# Altium footprint library Capacitance.PcbLib: 69 footprints (part 1 of 5)
Each footprint in its own frame and in the unit in brackets; x right, y up, seen from the top. Pads: shape width x height; smd on the part's side, far side on the other; paste and mask are expansions set on the pad; w line width, h text height; cw(c..) or ccw(c..) is an arc to the next point about the centre after c.
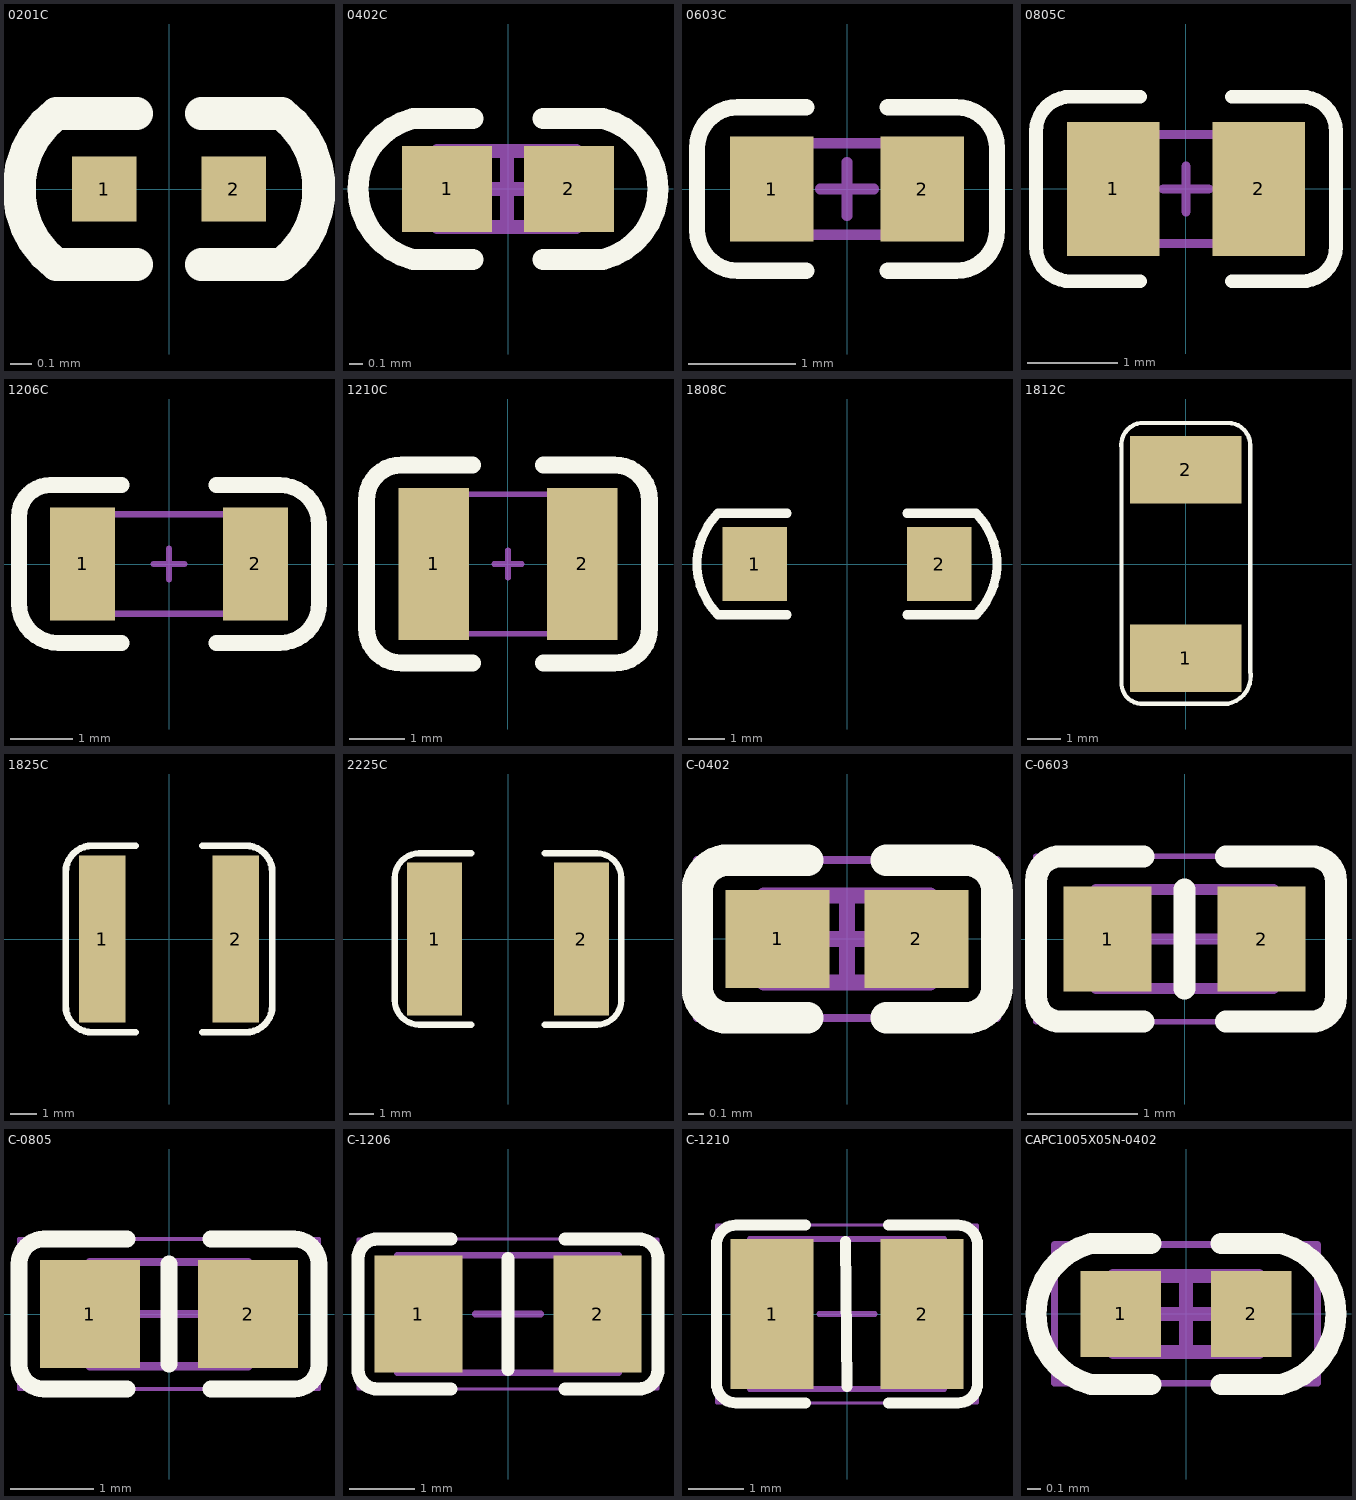
[diagram p0: the footprints below, top view; thin cyan lines are the x and y axes]

## 0201C [mm]
pads (2):
  rect 0.3x0.3 smd: 1(-0.3,0) 2(0.3,0)
Top Overlay:
  lines w0.152: -0.15,-0.35 -0.523,-0.35 cw(c-0.254,0) -0.523,0.35 -0.15,0.35 ; 0.15,-0.35 0.523,-0.35 ccw(c0.254,0) 0.523,0.35 0.15,0.35
Bottom Courtyard:
  text ".Designator" at 7.618,-0.508 h1.52
3D body "0201C.STEP": height 0.31, standoff 0, extent -0.3,-0.152 0.31,0.153

## 0402C [mm]
pads (2):
  rect 0.65x0.62 smd: 1(-0.44,0) 2(0.44,0)
Top Overlay:
  lines w0.152: -0.254,-0.508 -0.686,-0.508 cw(c-0.559,0) -0.686,0.508 -0.254,0.508 ; 0.254,-0.508 0.686,-0.508 ccw(c0.559,0) 0.686,0.508 0.254,0.508
Top Component Outline:
  lines w0.1: -0.508,-0.275 0.492,-0.275 0.492,0.275 -0.508,0.275 -0.508,-0.275
Top Component Center:
  lines w0.1: -0.258,0 0.242,0 ; -0.008,-0.25 -0.008,0.25
Top Value:
  text "'.Comment'" at -1.377,-0.189 h0.64
Top Designator:
  text "'.Designator'" at -2.176,-0.296 h0.76
3D body "CAPC-0402-T0.55-BN.stp": height 0.55, standoff 0, extent -0.533,-0.275 0.517,0.275

## 0603C [mm]
pads (2):
  rect 0.78x0.98 smd: 1(-0.7,0) 2(0.7,0)
Top Overlay:
  lines w0.152: -0.381,-0.762 -1.016,-0.762 cw(c-1.016,-0.381) -1.397,-0.381 -1.397,0.381 cw(c-1.016,0.381) -1.016,0.762 -0.889,0.762 -0.381,0.762 ; 0.381,-0.762 1.016,-0.762 ccw(c1.016,-0.381) 1.397,-0.381 1.397,0.381 ccw(c1.016,0.381) 1.016,0.762 0.381,0.762
Top Component Outline:
  lines w0.1: -0.8,-0.425 0.8,-0.425 0.8,0.425 -0.8,0.425 -0.8,-0.425
Top Component Center:
  lines w0.1: -0.25,0 0.25,0 ; 0,-0.25 0,0.25
Top Value:
  text "'.Comment'" at -1.369,-0.189 h0.64
Top Designator:
  text "'.Designator'" at -2.169,-0.159 h0.76
3D body "C0603C100C3GACTU.stp": height 0.87, standoff 0, extent -0.8,-0.4 0.8,0.4

## 0805C [mm]
pads (2):
  rect 1.02x1.47 smd: 1(-0.8,0) 2(0.8,0)
Top Overlay:
  lines w0.152: -0.508,-1.016 -1.27,-1.016 cw(c-1.27,-0.635) -1.651,-0.635 -1.651,0.635 cw(c-1.27,0.635) -1.27,1.016 -0.508,1.016 ; 0.508,-1.016 1.27,-1.016 ccw(c1.27,-0.635) 1.651,-0.635 1.651,0.508 1.651,0.635 ccw(c1.27,0.635) 1.27,1.016 0.508,1.016
Top Component Outline:
  lines w0.1: -1,-0.6 -1,0.6 1,0.6 1,-0.6 -1,-0.6
Top Component Center:
  lines w0.1: -0.25,0 0.25,0 ; 0,-0.25 0,0.25
Top Value:
  text "'.Comment'" at -1.928,-0.266 h0.89
Top Designator:
  text "'.Designator'" at -2.917,-0.396 h1.02
3D body "C0805C100J5GACTU.stp": height 0.88, standoff 0, extent -1,-0.625 1,0.625

## 1206C [mm]
pads (2):
  rect 1.05x1.82 smd: 1(-1.39,0) 2(1.39,0)
Top Overlay:
  lines w0.254: -0.762,-1.27 -1.778,-1.27 cw(c-1.778,-0.635) -2.413,-0.635 -2.413,0.762 cw(c-1.905,0.762) -1.905,1.27 -0.762,1.27 ; 0.762,-1.27 1.778,-1.27 ccw(c1.778,-0.635) 2.413,-0.635 2.413,0.635 ccw(c1.778,0.635) 1.778,1.27 0.762,1.27
Top Component Outline:
  lines w0.1: -1.6,-0.8 -1.6,0.8 1.6,0.8 1.6,-0.8 -1.6,-0.8
Top Component Center:
  lines w0.1: -0.25,0 0.25,0 ; 0,-0.25 0,0.25
Top Value:
  text "'.Comment'" at -1.928,-0.296 h0.89
Top Designator:
  text "'.Designator'" at -3.28,-0.446 h1.14
3D body "CL31B106KAHNNNE.stp": height 1.8, standoff 0, extent -1.6,-0.8 1.6,0.8

## 1210C [mm]
pads (2):
  rect 1.26x2.72 smd: 1(-1.33,0) 2(1.33,0)
Top Overlay:
  lines w0.305: -0.635,-1.778 -1.905,-1.778 cw(c-1.905,-1.143) -2.54,-1.143 -2.54,1.143 cw(c-1.905,1.143) -1.905,1.778 -0.635,1.778 ; 0.635,-1.778 1.905,-1.778 ccw(c1.905,-1.143) 2.54,-1.143 2.54,1.143 ccw(c1.905,1.143) 1.905,1.778 0.635,1.778
Top Component Outline:
  lines w0.1: -1.6,-1.25 1.6,-1.25 1.6,1.25 -1.6,1.25 -1.6,-1.25
Top Component Center:
  lines w0.1: -0.25,0 0.25,0 ; 0,-0.25 0,0.25
Top Value:
  text "'.Comment'" at -1.928,-0.296 h0.89
Top Designator:
  text "'.Designator'" at -3.269,-0.239 h1.14
3D body "GRM32ER61C476KE15L.stp": height 2.7, standoff 0, extent -1.6,-1.25 1.6,1.25

## 1808C [mil]
pads (2):
  rect 70x80 smd: 1(-100,0) 2(100,0)
Top Overlay:
  lines w9.84: -140,-55 cw(c-85,0) -140,55 ; 140,-55 ccw(c85,0) 140,55
  lines w10: -140,-55 -65,-55 ; -140,55 -65,55 ; 65,-55 140,-55 ; 65,55 140,55
Bottom Courtyard:
  text ".Designator" at 299.9,-19.99 h60
3D body "1808C.STEP": height 80.1, standoff 0, extent -107.5,-40 117.5,40

## 1812C [mm]
pads (2):
  rect 3.302x2 smd: 1(0,-2.786) 2(0,2.786)
Top Overlay:
  lines w0.127: -1.905,3.412 cw(c-1.245,3.513) -1.346,4.174 1.245,4.174 cw(c1.245,3.513) 1.905,3.513 1.905,-3.167 cw(c1.092,-3.319) 1.245,-4.132 -1.346,-4.132 cw(c-1.295,-3.523) -1.905,-3.472 -1.905,3.615
Bottom Courtyard:
  text ".Designator" at 7.621,-0.487 h1.52
3D body "1812 SMD Capacitor.STEP": height 1.6, standoff 0, extent -1.6,-2.242 1.6,2.258

## 1825C [mil]
pads (2):
  rect 70x250 smd: 1(-100,0) 2(100,0)
Top Overlay:
  lines w10: -50,-140 -115,-140 cw(c-115,-100) -155,-100 -155,100 cw(c-115,100) -115,140 -50,140 ; 50,-140 115,-140 ccw(c115,-100) 155,-100 155,100 ccw(c115,100) 115,140 50,140
Bottom Courtyard:
  text ".Designator" at 299.9,-19.99 h60
3D body "1825C.STEP": height 100.1, standoff 0, extent -110.62,-125.99 110.63,126.01

## 2225C [mil]
pads (2):
  rect 90x250 smd: 1(-120,0) 2(120,0)
Top Overlay:
  lines w10: -60,-140 -145,-140 cw(c-145,-100) -185,-100 -185,100 cw(c-145,100) -145,140 -60,140 ; 60,-140 145,-140 ccw(c145,-100) 185,-100 185,100 ccw(c145,100) 145,140 60,140
Bottom Courtyard:
  text ".Designator" at 299.9,-19.99 h60
3D body "2225C.STEP": height 70.87, standoff 0, extent -112.2,-124.99 112.21,125

## C-0402 [mm] "Chip Capacitor, 2-Leads, Body 1.00x0.50mm, IPC Medium Density"
height 0.5
pads (2):
  rect 0.66x0.62 smd: 1(-0.44,0) 2(0.44,0)
Top Overlay:
  lines w0.2: -0.25,-0.5 -0.75,-0.5 ; -0.25,0.5 -0.75,0.5 ccw(c-0.75,0.3) -0.95,0.3 -0.95,-0.3 ; 0.25,-0.5 0.75,-0.5 ccw(c0.75,-0.3) 0.95,-0.3 0.95,0.3 ccw(c0.75,0.3) 0.75,0.5 0.25,0.5 ; -0.95,-0.3 ccw(c-0.75,-0.3) -0.75,-0.5 ; -0.95,-0.3 ccw(c-0.75,-0.3) -0.75,-0.5
Top Value:
  text "'.Comment'" at -1.292,-0.174 h0.6
Top Designator:
  text "'.Designator'" at -1.713,-0.125 h0.6
Top Courtyard:
  lines w0.05: -0.95,-0.5 0.95,-0.5 0.95,0.5 -0.95,0.5 -0.95,-0.5
  lines w0.1: -0.275,0 0.275,0 ; 0,-0.275 0,0.275
Top Assembly:
  lines w0.1: -0.525,-0.275 0.525,-0.275 0.525,0.275 -0.525,0.275 -0.525,-0.275
3D body "CAPC-0402-T0.55-BN.stp": height 0.55, standoff 0, extent -0.525,-0.275 0.525,0.275

## C-0603 [mm] "Chip Capacitor, 2-Leads, Body 1.60x0.80mm, IPC Medium Density"
height 0.8
pads (2):
  rect 0.8x0.95 smd: 1(-0.7,0) 2(0.7,0)
Top Overlay:
  lines w0.2: -0.375,-0.75 -1.125,-0.75 cw(c-1.125,-0.525) -1.35,-0.525 -1.35,0.525 cw(c-1.125,0.525) -1.125,0.75 -0.375,0.75 ; 0,-0.45 0,0.45 ; 0.375,-0.75 1.15,-0.75 ccw(c1.15,-0.525) 1.375,-0.525 1.375,0.525 ccw(c1.15,0.525) 1.15,0.75 0.375,0.75
Top Value:
  text "'.Comment'" at -1.718,-0.231 h0.8
Top Designator:
  text "'.Designator'" at -2.279,-0.167 h0.8
Top Courtyard:
  lines w0.05: -1.35,-0.75 1.35,-0.75 1.35,0.75 -1.35,0.75 -1.35,-0.75
  lines w0.1: -0.45,0 0.45,0 ; 0,-0.45 0,0.45
Top Assembly:
  lines w0.1: -0.805,-0.45 0.805,-0.45 0.805,0.45 -0.805,0.45 -0.805,-0.45
3D body "C0603C100C3GACTU.stp": height 0.87, standoff 0, extent -0.8,-0.4 0.8,0.4

## C-0805 [mm] "Chip Capacitor, 2-Leads, Body 2.00x1.20mm, IPC Medium Density"
height 1.15
pads (2):
  rect 1.2x1.3 smd: 1(-0.95,0) 2(0.95,0)
Top Overlay:
  lines w0.2: -0.5,-0.9 -1.5,-0.9 cw(c-1.5,-0.6) -1.8,-0.6 -1.8,0.6 cw(c-1.5,0.6) -1.5,0.9 -0.5,0.9 ; 0,-0.6 0,0.6 ; 0.5,-0.9 1.5,-0.9 ccw(c1.5,-0.6) 1.8,-0.6 1.8,0.6 ccw(c1.5,0.6) 1.5,0.9 ; 0.5,0.9 1.5,0.9 ; 1.5,0.9 ccw(c1.5,0.9) 1.5,0.9
Top Value:
  text "'.Comment'" at -2.157,-0.291 h1
Top Designator:
  text "'.Designator'" at -2.86,-0.209 h1
Top Courtyard:
  lines w0.05: -1.8,-0.9 -1.8,0.9 1.8,0.9 1.8,-0.9 -1.8,-0.9
  lines w0.1: -0.5,0 0.5,0 ; 0,-0.5 0,0.5
Top Assembly:
  lines w0.1: -0.95,-0.625 -0.95,0.625 0.95,0.625 0.95,-0.625 -0.95,-0.625
3D body "C0805C100J5GACTU.stp": height 0.88, standoff 0, extent -1,-0.625 1,0.625

## C-1206 [mm] "Chip Capacitor, 2-Leads, Body 3.20x1.60mm, IPC Medium Density"
height 0.85
pads (2):
  rect 1.35x1.8 smd: 1(-1.375,0) 2(1.375,0)
Top Overlay:
  lines w0.2: -0.875,-1.15 -2,-1.15 cw(c-2,-0.85) -2.3,-0.85 -2.3,0.85 cw(c-2,0.85) -2,1.15 -0.884,1.15 -0.875,1.15 ; 0,-0.85 0,0.85 ; 0.875,-1.15 2,-1.15 ccw(c2,-0.85) 2.3,-0.85 2.3,0.85 ccw(c2,0.85) 2,1.15 0.875,1.15 0.875,1.15
Top Value:
  text "'.Comment'" at -3.022,-0.407 h1.4
Top Designator:
  text "'.Designator'" at -4.007,-0.293 h1.4
Top Courtyard:
  lines w0.05: -2.3,-1.15 2.3,-1.15 2.3,1.15 -2.3,1.15 -2.3,-1.15
  lines w0.1: -0.5,0 0.5,0 ; 0,-0.5 0,0.5
Top Assembly:
  lines w0.1: -1.7,-0.9 1.7,-0.9 1.7,0.9 -1.7,0.9 -1.7,-0.9
3D body "CAPC-1206-T1.4-BN.stp": height 1.4, standoff 0, extent -1.675,-0.875 1.675,0.875

## C-1210 [mm] "Chip Capacitor, 2-Leads, Body 3.25x2.50mm, IPC Medium Density"
height 1.8
pads (2):
  rect 1.5x2.7 smd: 1(-1.35,0) 2(1.35,0)
Top Overlay:
  lines w0.2: -0.75,-1.6 -2,-1.6 cw(c-2,-1.25) -2.35,-1.25 -2.35,1.25 cw(c-2,1.25) -2,1.6 -0.75,1.6 ; -0.025,1.3 0,-1.3 ; 0.75,-1.6 2,-1.6 ccw(c2,-1.25) 2.35,-1.25 2.35,1.25 ccw(c2,1.25) 2,1.6 0.75,1.6
Top Value:
  text "'.Comment'" at -3.022,-0.407 h1.4
Top Designator:
  text "'.Designator'" at -4.007,-0.293 h1.4
Top Courtyard:
  lines w0.05: -2.35,-1.6 2.35,-1.6 2.35,1.6 -2.35,1.6 -2.35,-1.6
  lines w0.1: -0.5,0 0.5,0 ; 0,-0.5 0,0.5
Top Assembly:
  lines w0.1: -1.75,-1.35 1.75,-1.35 1.75,1.35 -1.75,1.35 -1.75,-1.35
3D body "CAPC-1210-T1.8-BN.stp": height 1.8, standoff 0, extent -1.75,-1.35 1.75,1.35

## CAPC1005X05N-0402 [mm] "Chip Capacitor, 2-Leads, Body 1.00x0.50mm, IPC Medium Density"
height 0.5
pads (2):
  rect 0.58x0.62 smd: 1(-0.47,0) 2(0.47,0)
Top Overlay:
  lines w0.152: -0.254,-0.508 -0.686,-0.508 cw(c-0.559,0) -0.686,0.508 -0.254,0.508 ; 0.254,-0.508 0.686,-0.508 ccw(c0.559,0) 0.686,0.508 0.254,0.508
Top Value:
  text "'.Comment'" at -2.157,-0.291 h1
Top Designator:
  text "'.Designator'" at -2.86,-0.209 h1
Top Courtyard:
  lines w0.05: -0.95,-0.5 0.95,-0.5 0.95,0.5 -0.95,0.5 -0.95,-0.5
  lines w0.1: -0.275,0 0.275,0 ; 0,-0.275 0,0.275
Top Assembly:
  lines w0.1: -0.525,-0.275 0.525,-0.275 0.525,0.275 -0.525,0.275 -0.525,-0.275
3D body "CAPC-0402-T0.55-BN.stp": height 0.55, standoff 0, extent -0.525,-0.275 0.525,0.275